# Altium schematic symbol library NHD-0420E2Z-FSW-GBW.SchLib: 1 symbol
Pins are listed as number, name and electrical type; pins without a type are passive.

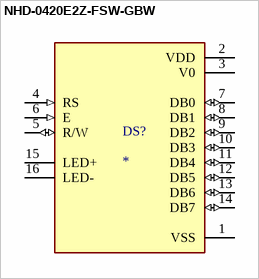
[diagram p0: symbol NHD-0420E2Z-FSW-GBW]

## NHD-0420E2Z-FSW-GBW
designator DS?
Character Display Modules LCD NHD 4x20 STN Gray Transflective 8-Bit Parallel | Newhaven Display International NHD-0420E2Z-FSW-GBW; SnapEDA_Link: https://www.snapeda.com/parts/NHD-0420E2Z-FSW-GBW/Newhaven+Display/view-part/?ref=snap; Package: None; Value: *; MF: Newhaven Display; MP: NHD-0420E2Z-FSW-GBW; Check_prices: https://www.snapeda.com/parts/NHD-0420E2Z-FSW-GBW/Newhaven+Display/view-part/?ref=eda
footprint LCD_NHD-0420E2Z-FSW-GBW
pins: 1 VSS (power), 2 VDD (power), 3 V0 (power), 4 RS (in), 5 R/W (io), 6 E (in), 7 DB0 (io), 8 DB1 (io), 9 DB2 (io), 10 DB3 (io), 11 DB4 (io), 12 DB5 (io), 13 DB6 (io), 14 DB7 (io), 15 LED+, 16 LED-